# Altium footprint library Pump_Controller.PcbLib: 5 footprints
Each footprint in its own frame and in the unit in brackets; x right, y up, seen from the top. Pads: shape width x height; smd on the part's side, far side on the other; paste and mask are expansions set on the pad; w line width, h text height; cw(c..) or ccw(c..) is an arc to the next point about the centre after c.
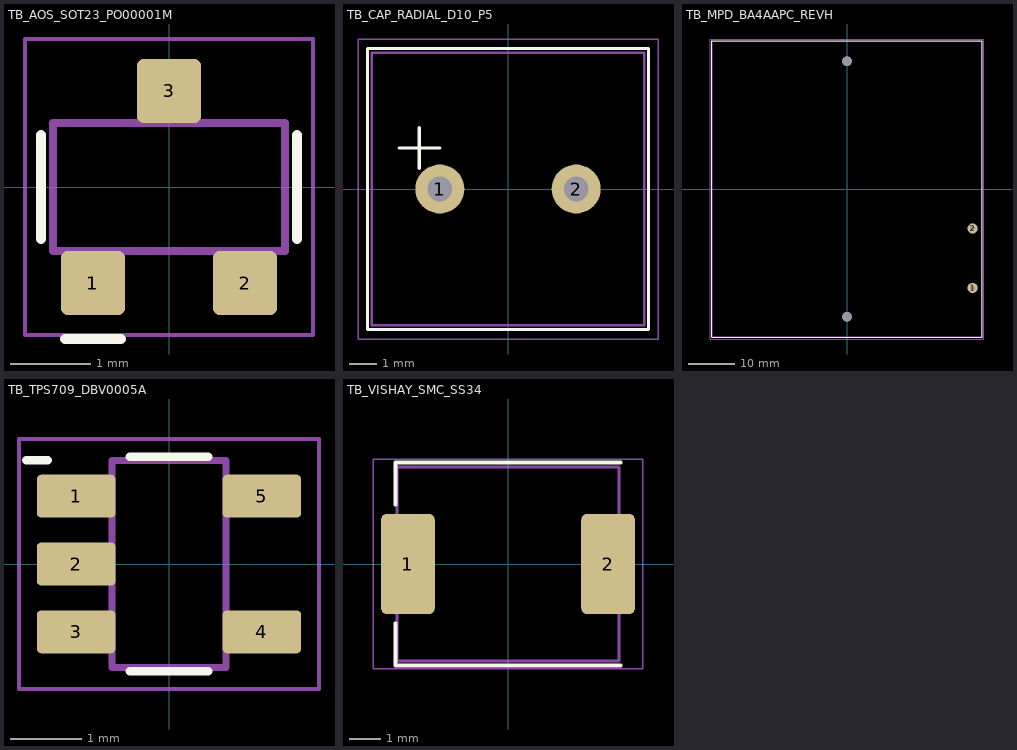
[diagram p0: the footprints below, top view; thin cyan lines are the x and y axes]

## TB_AOS_SOT23_PO00001M [mm] "30V N-channel MOSFET; G=1 S=2 D=3"
pads (3):
  rrect20% 0.8x0.8 smd: 1(-0.95,-1.2) 2(0.95,-1.2) 3(0,1.2)
Top Overlay:
  lines w0.12: -1.6,-0.65 -1.6,0.65 ; -1.3,-1.9 -0.6,-1.9 ; 1.6,-0.65 1.6,0.65
Mechanical 1:
  lines w0.05: -1.8,-1.85 -1.8,1.85 1.8,1.85 1.8,-1.85 -1.8,-1.85
Mechanical 13:
  lines w0.1: -1.45,-0.8 -1.45,0.8 1.45,0.8 1.45,-0.8 -1.45,-0.8
3D body: height 1.25, standoff 0, extent -1.45,-0.8 1.45,0.8

## TB_CAP_RADIAL_D10_P5 [mm] "Generic polarized radial capacitor; D<=10mm P=5mm H<=20mm; 220uF >=25V target"
pads (2):
  round 1.8 hole 0.9: 1(-2.5,0) 2(2.5,0)
Top Overlay:
  lines w0.12: -4,1.5 -2.5,1.5 ; -3.25,0.75 -3.25,2.25 ; -5.15,-5.15 -5.15,5.15 5.15,5.15 5.15,-5.15 -5.15,-5.15
Mechanical 1:
  lines w0.05: -5.5,-5.5 -5.5,5.5 5.5,5.5 5.5,-5.5 -5.5,-5.5
Mechanical 13:
  lines w0.1: -5,-5 -5,5 5,5 5,-5 -5,-5
3D body: height 20, standoff 0, extent -5,-5 5,5

## TB_MPD_BA4AAPC_REVH [mm] "4xAA PCB holder; layout model; terminal polarity requires sample check"
pads (4):
  round 2.2 hole 1.02: 1(26.82,-21.135) 2(26.82,-8.435)
  round 2.03 hole 2.03 unplated: ""(0,-27.305) ""(0,27.305)
Top Overlay:
  lines w0.12: -28.89,-31.695 -28.89,31.695 28.89,31.695 28.89,-31.695 -28.89,-31.695
Mechanical 1:
  lines w0.05: -29.24,-32.045 -29.24,32.045 29.24,32.045 29.24,-32.045 -29.24,-32.045
Mechanical 13:
  lines w0.1: -28.74,-31.545 -28.74,31.545 28.74,31.545 28.74,-31.545 -28.74,-31.545
3D body: height 15.88, standoff 0, extent -28.74,-31.545 28.74,31.545

## TB_TPS709_DBV0005A [mm] "3.3V 150mA 30V low-Iq LDO; DBV non-A/B pinout"
pads (5):
  rrect20% 1.1x0.6 smd: 1(-1.3,0.95) 2(-1.3,0) 3(-1.3,-0.95) 4(1.3,-0.95) 5(1.3,0.95)
Top Overlay:
  lines w0.12: -2,1.45 -1.7,1.45 ; -0.55,-1.5 0.55,-1.5 ; -0.55,1.5 0.55,1.5
Mechanical 1:
  lines w0.05: -2.1,-1.75 -2.1,1.75 2.1,1.75 2.1,-1.75 -2.1,-1.75
Mechanical 13:
  lines w0.1: -0.8,-1.45 -0.8,1.45 0.8,1.45 0.8,-1.45 -0.8,-1.45
3D body: height 1.45, standoff 0, extent -0.8,-1.45 0.8,1.45

## TB_VISHAY_SMC_SS34 [mm] "40V 3A Schottky flyback diode; SMC DO-214AB"
pads (2):
  rrect20% 1.72x3.2 smd: 1(-3.205,0) 2(3.205,0)
Top Overlay:
  lines w0.12: -3.6,-1.9 -3.6,-3.25 3.6,-3.25 ; -3.6,1.9 -3.6,3.25 3.6,3.25
Mechanical 1:
  lines w0.05: -4.32,-3.36 -4.32,3.36 4.32,3.36 4.32,-3.36 -4.32,-3.36
Mechanical 13:
  lines w0.1: -3.555,-3.11 -3.555,3.11 3.555,3.11 3.555,-3.11 -3.555,-3.11
3D body: height 2.62, standoff 0, extent -3.555,-3.11 3.555,3.11